# Altium schematic symbol library 2020-05-10_22-41-12.SchLib: 2 symbols
Pins are listed as number, name and electrical type; pins without a type are passive.

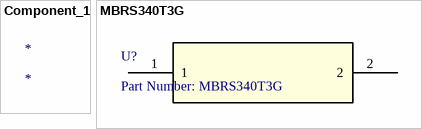
[diagram p0: symbols Component_1 to MBRS340T3G]

## Component_1
designator *

## MBRS340T3G
designator U?, comment Part Number: MBRS340T3G
No Description Available; Vendor: ON Semiconductor; Built_By: EMA_UL_Team; SourceLibrary: ON_Semi_2010-01-01; Manufacturer_Part_Number: MBRS340T3G; Copyright: Copyright (C) 2018 Accelerated Designs. All rights reserved; RefDes: RefDes; Type: DEV; Value: Value
footprint SMC_ONS
pins: 1, 2